# Altium schematic symbol library MT41K512M16VRP-107IT&colon_P.SchLib: 2 symbols
Pins are listed as number, name and electrical type; pins without a type are passive.

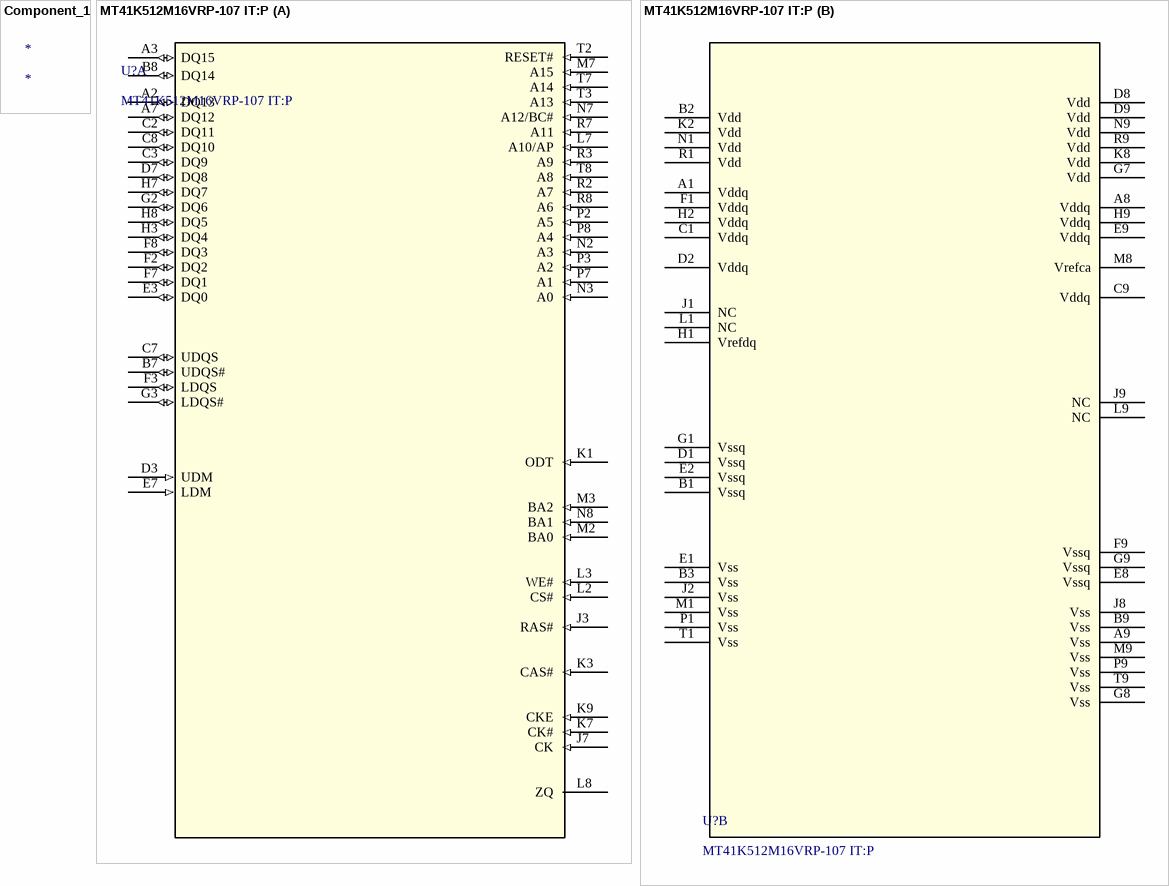
[diagram p0: symbols Component_1 to MT41K512M16VRP-107 IT:P]

## Component_1
designator *

## MT41K512M16VRP-107 IT:P
designator U?
No Description Available; Mfr_Name: Micron; Copyright: Copyright (C) 2022 Ultra Librarian. All rights reserved.; Manufacturer_Part_Number: MT41K512M16VRP-107 IT:P; RefDes: RefDes; Type: DEV
footprint FBGA96_MRN
part A pins: A2 DQ13 (io), A3 DQ15 (io), A7 DQ12 (io), B7 UDQS# (io), B8 DQ14 (io), C2 DQ11 (io), C3 DQ9 (io), C7 UDQS (io), C8 DQ10 (io), D3 UDM (in), D7 DQ8 (io), E3 DQ0 (io), E7 LDM (in), F2 DQ2 (io), F3 LDQS (io), F7 DQ1 (io), F8 DQ3 (io), G2 DQ6 (io), G3 LDQS# (io), H3 DQ4 (io), H7 DQ7 (io), H8 DQ5 (io), J3 RAS# (in), J7 CK (in), K1 ODT (in), K3 CAS# (in), K7 CK# (in), K9 CKE (in), L2 CS# (in), L3 WE# (in), L7 A10/AP (in), L8 ZQ, M2 BA0 (in), M3 BA2 (in), M7 A15 (in), N2 A3 (in), N3 A0 (in), N7 A12/BC# (in), N8 BA1 (in), P2 A5 (in), P3 A2 (in), P7 A1 (in), P8 A4 (in), R2 A7 (in), R3 A9 (in), R7 A11 (in), R8 A6 (in), T2 RESET# (in), T3 A13 (in), T7 A14 (in), T8 A8 (in)
part B pins: A1 Vddq (power), A8 Vddq (power), A9 Vss, B1 Vssq (power), B2 Vdd (power), B3 Vss (power), B9 Vss (power), C1 Vddq, C9 Vddq, D1 Vssq (power), D2 Vddq, D8 Vdd, D9 Vdd, E1 Vss, E2 Vssq, E8 Vssq, E9 Vddq, F1 Vddq, F9 Vssq, G1 Vssq, G7 Vdd, G8 Vss, G9 Vssq, H1 Vrefdq, H2 Vddq, H9 Vddq, J1 NC, J2 Vss, J8 Vss, J9 NC, K2 Vdd, K8 Vdd, L1 NC, L9 NC, M1 Vss, M8 Vrefca, M9 Vss, N1 Vdd, N9 Vdd, P1 Vss, P9 Vss, R1 Vdd, R9 Vdd, T1 Vss, T9 Vss